# Altium footprint library VQFN24_RGE_TEX.PcbLib: 1 footprints
Each footprint in its own frame and in the unit in brackets; x right, y up, seen from the top. Pads: shape width x height; smd on the part's side, far side on the other; paste and mask are expansions set on the pad; w line width, h text height; cw(c..) or ccw(c..) is an arc to the next point about the centre after c.
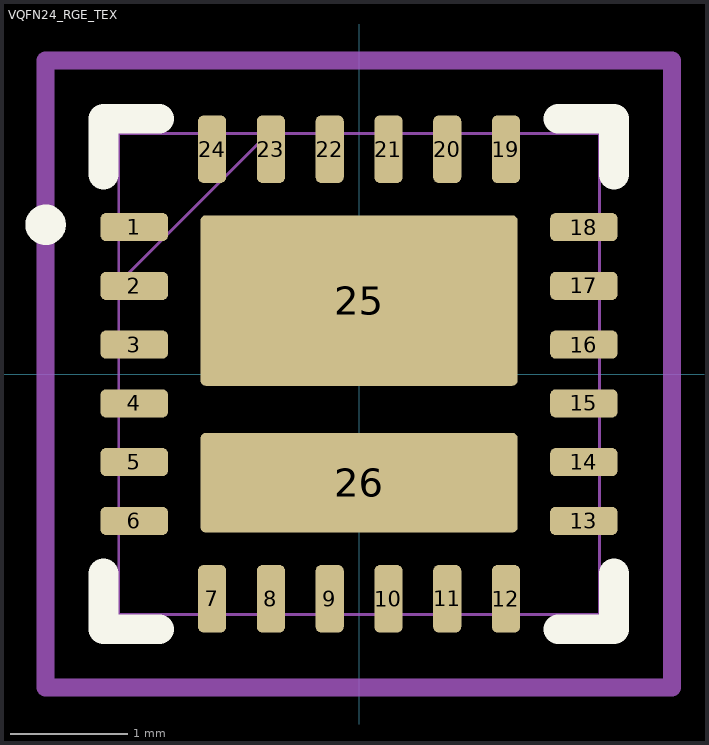
[diagram p0: the footprint, top view; thin cyan lines are the x and y axes]

## VQFN24_RGE_TEX [mm]
pads (26):
  rrect41% 0.575x0.24 smd: 1(-1.913,1.25) 2(-1.913,0.75) 3(-1.913,0.25) 4(-1.913,-0.25) 5(-1.913,-0.75) 6(-1.913,-1.25) 13(1.913,-1.25) 14(1.913,-0.75) 15(1.913,-0.25) 16(1.913,0.25) 17(1.913,0.75) 18(1.913,1.25)
  rrect41% 0.24x0.575 smd: 7(-1.25,-1.913) 8(-0.75,-1.913) 9(-0.25,-1.913) 10(0.25,-1.913) 11(0.75,-1.913) 12(1.25,-1.913) 19(1.25,1.913) 20(0.75,1.913) 21(0.25,1.913) 22(-0.25,1.913) 23(-0.75,1.913) 24(-1.25,1.913)
  rrect6% 2.7x1.45 smd: 25(0,0.625)
  rrect11% 2.7x0.85 smd: 26(0,-0.925)
Top Overlay:
  circle w0.178: c-2.667,1.27 r0.083
  lines w0.254: -2.174,-1.697 -2.174,-2.172 -1.7,-2.172 ; -2.174,1.697 -2.174,2.172 -1.7,2.172 ; 1.695,-2.172 2.169,-2.172 2.169,-1.697 ; 1.695,2.172 2.169,2.172 2.169,1.697
Mechanical 13:
  lines w0.025: -2.045,0.775 -0.775,2.045 ; -2.045,-2.045 -2.045,2.045 2.045,2.045 2.045,-2.045 -2.045,-2.045 ; -2.045,-1.39 -2.045,-1.11 -2.045,-1.39 ; -2.045,-0.89 -2.045,-0.61 -2.045,-0.89 ; -2.045,-0.39 -2.045,-0.11 -2.045,-0.39 ; -2.045,0.11 -2.045,0.39 -2.045,0.11 ; -2.045,0.61 -2.045,0.89 -2.045,0.61 ; -2.045,1.11 -2.045,1.39 -2.045,1.11 ; -1.39,-2.045 -1.11,-2.045 -1.39,-2.045 ; -1.39,2.045 -1.11,2.045 -1.39,2.045 ; -0.89,-2.045 -0.61,-2.045 -0.89,-2.045 ; -0.89,2.045 -0.61,2.045 -0.89,2.045 ; -0.39,-2.045 -0.11,-2.045 -0.39,-2.045 ; -0.39,2.045 -0.11,2.045 -0.39,2.045 ; 0.11,-2.045 0.39,-2.045 0.11,-2.045 ; 0.11,2.045 0.39,2.045 0.11,2.045 ; 0.61,-2.045 0.89,-2.045 0.61,-2.045 ; 0.61,2.045 0.89,2.045 0.61,2.045 ; 1.11,-2.045 1.39,-2.045 1.11,-2.045 ; 1.11,2.045 1.39,2.045 1.11,2.045 ; 2.045,-1.39 2.045,-1.11 2.045,-1.39 ; 2.045,-0.89 2.045,-0.61 2.045,-0.89 ; 2.045,-0.39 2.045,-0.11 2.045,-0.39 ; 2.045,0.11 2.045,0.39 2.045,0.11 ; 2.045,0.61 2.045,0.89 2.045,0.61 ; 2.045,1.11 2.045,1.39 2.045,1.11
Mechanical 15:
  lines w0.152: -2.669,-2.667 -2.669,2.667 2.665,2.667 2.665,-2.667 -2.669,-2.667
3D body "RGE0024M.stp": height 1, standoff 0, extent -2,-2 2,2